# Altium footprint library Passive-Cap.PcbLib: 70 footprints (part 4 of 5)
Each footprint in its own frame and in the unit in brackets; x right, y up, seen from the top. Pads: shape width x height; smd on the part's side, far side on the other; paste and mask are expansions set on the pad; w line width, h text height; cw(c..) or ccw(c..) is an arc to the next point about the centre after c.
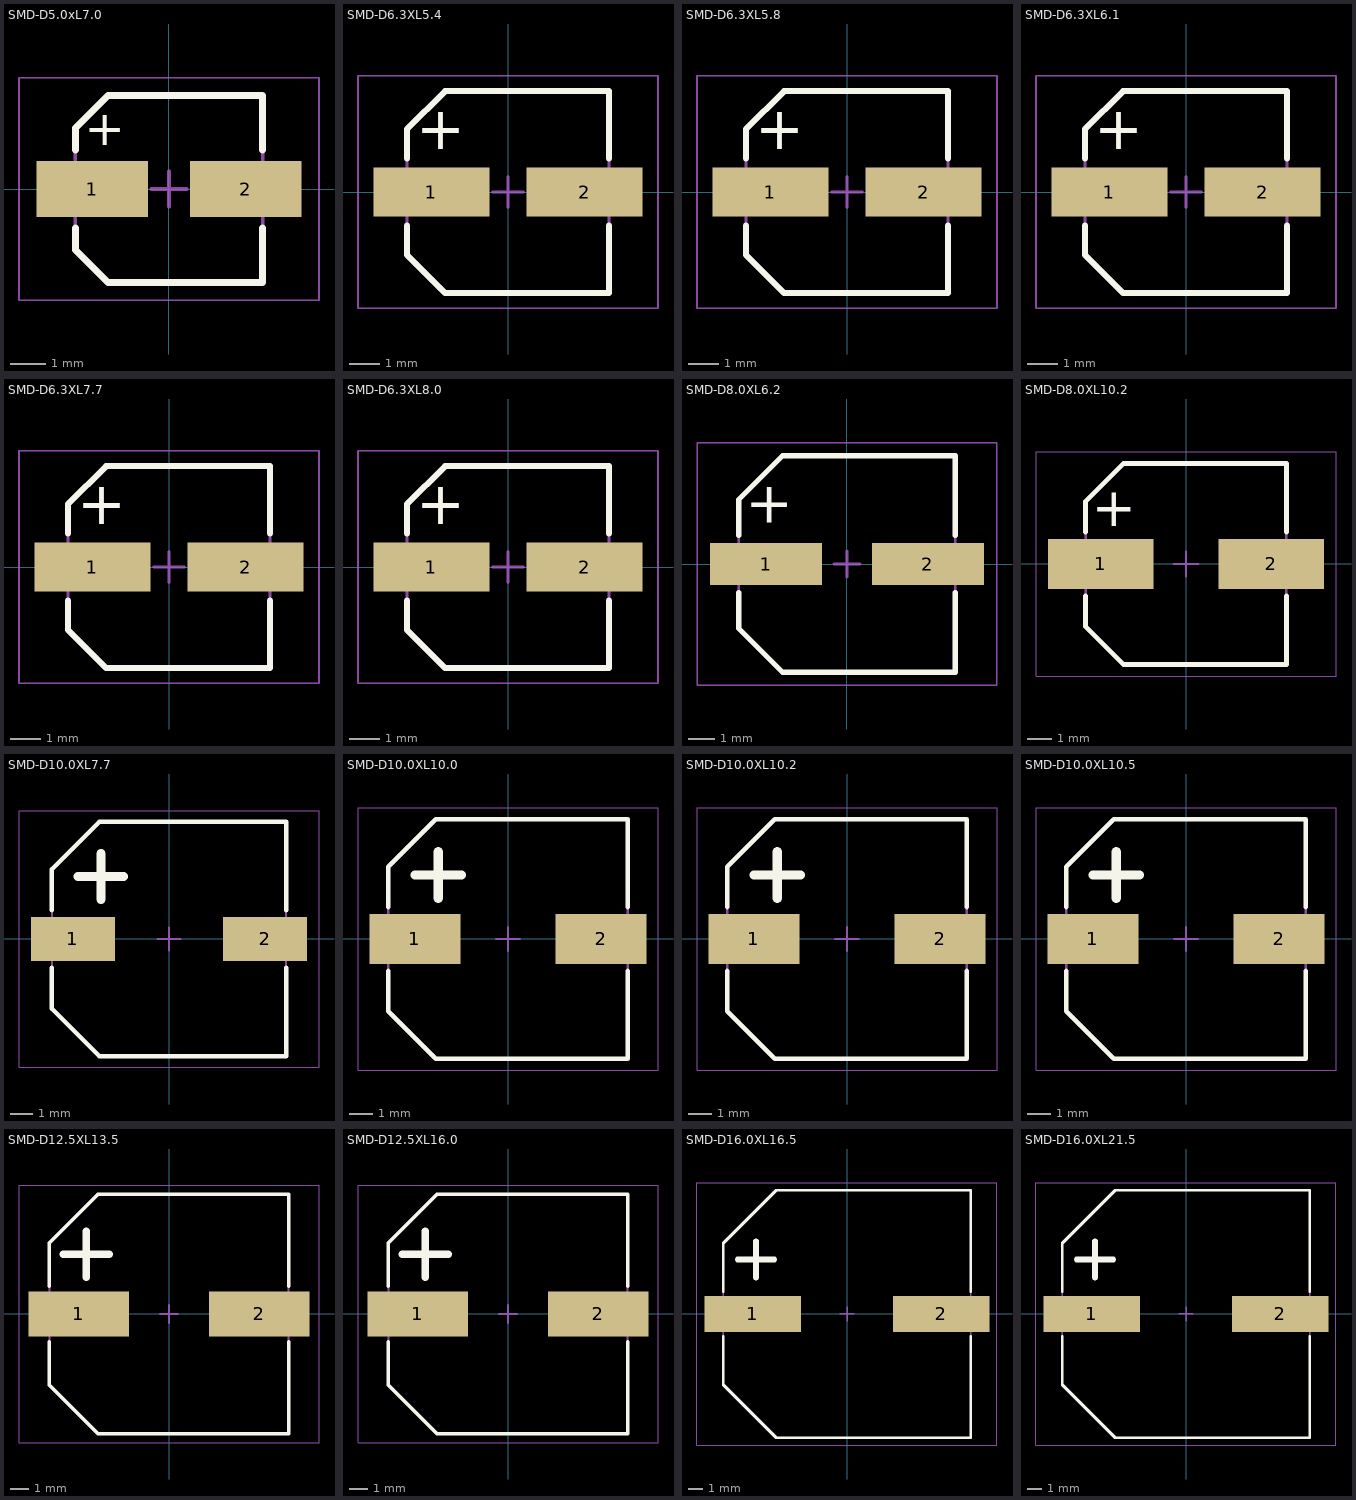
[diagram p3: the footprints below, top view; thin cyan lines are the x and y axes]

## SMD-D5.0xL7.0 [mm] "Aluminum Electrolytic Capacitor, Body 5.30x5.30x7.0mm, IPC Medium Density"
height 5.8
pads (2):
  rect 3.15x1.6 smd: 1(-2.175,0) 2(2.175,0)
Top Overlay:
  lines w0.2: -2.65,-1.1 -2.65,-1.725 -1.725,-2.65 2.65,-2.65 2.65,-1.1 ; -2.65,1.1 -2.65,1.725 -1.725,2.65 2.65,2.65 2.65,1.1
  text "+" at -1.237,2.092 h1
Top Courtyard:
  lines w0.05: -4.25,-3.15 4.25,-3.15 4.25,3.15 -4.25,3.15 -4.25,-3.15
  lines w0.1: -0.5,0 0.5,0 ; 0,-0.5 0,0.5
Top Assembly:
  lines w0.1: -2.65,-1.725 -2.65,1.725 -1.725,2.65 2.65,2.65 2.65,-2.65 -1.725,-2.65 -2.65,-1.725
3D body "CAP SMT AL ELEC D5.00mm H7.00mm S5.30mm.step": height 7, standoff 0, extent -2.75,-2.65 2.75,2.65

## SMD-D6.3XL5.4 [mm] "Aluminum Electrolytic Capacitor, Body 6.60x6.60x5.40mm, IPC Medium Density"
height 5.8
pads (2):
  rect 3.8x1.6 smd: 1(-2.5,0) 2(2.5,0)
Top Overlay:
  lines w0.2: -3.3,-1.1 -3.3,-2.05 -2.05,-3.3 3.3,-3.3 3.3,-1.1 ; -3.3,1.1 -3.3,2.05 -2.05,3.3 3.3,3.3 3.3,1.1
  text "+" at -1.4,2.6 h1.4
Top Courtyard:
  lines w0.05: -4.9,-3.8 -4.9,3.8 4.9,3.8 4.9,-3.8 -4.9,-3.8
  lines w0.1: -0.5,0 0.5,0 ; 0,-0.5 0,0.5
Top Assembly:
  lines w0.1: -3.3,-2.05 -2.05,-3.3 3.3,-3.3 3.3,3.3 -2.05,3.3 -3.3,2.05 -3.3,-2.05
3D body "CAP SMT AL ELEC D6.30mm H5.40mm S6.60mm.step": height 5.3, standoff -0.1, extent -4,-3.4 4,3.2

## SMD-D6.3XL5.8 [mm] "Aluminum Electrolytic Capacitor, Body 6.60x6.60x5.80mm, IPC Medium Density"
height 5.8
pads (2):
  rect 3.8x1.6 smd: 1(-2.5,0) 2(2.5,0)
Top Overlay:
  lines w0.2: -3.3,-1.1 -3.3,-2.05 -2.05,-3.3 3.3,-3.3 3.3,-1.1 ; -3.3,1.1 -3.3,2.05 -2.05,3.3 3.3,3.3 3.3,1.1
  text "+" at -1.4,2.6 h1.4
Top Courtyard:
  lines w0.05: -4.9,-3.8 4.9,-3.8 4.9,3.8 -4.9,3.8 -4.9,-3.8
  lines w0.1: -0.5,0 0.5,0 ; 0,-0.5 0,0.5
Top Assembly:
  lines w0.1: -3.3,-2.05 -3.3,2.05 -2.05,3.3 3.3,3.3 3.3,-3.3 -2.05,-3.3 -3.3,-2.05
3D body "CAP SMT AL ELEC D6.30mm H5.80mm S6.60mm.step": height 5.8, standoff 0, extent -4,-3.3 4,3.3

## SMD-D6.3XL6.1 [mm] "Aluminum Electrolytic Capacitor, Body 6.60x6.60x6.1mm, IPC Medium Density"
height 5.8
pads (2):
  rect 3.8x1.6 smd: 1(-2.5,0) 2(2.5,0)
Top Overlay:
  lines w0.2: -3.3,-1.1 -3.3,-2.05 -2.05,-3.3 3.3,-3.3 3.3,-1.1 ; -3.3,1.1 -3.3,2.05 -2.05,3.3 3.3,3.3 3.3,1.1
  text "+" at -1.4,2.6 h1.4
Top Courtyard:
  lines w0.05: -4.9,-3.8 -4.9,3.8 4.9,3.8 4.9,-3.8 -4.9,-3.8
  lines w0.1: -0.5,0 0.5,0 ; 0,-0.5 0,0.5
Top Assembly:
  lines w0.1: -3.3,-2.05 -2.05,-3.3 3.3,-3.3 3.3,3.3 -2.05,3.3 -3.3,2.05 -3.3,-2.05
3D body "CAP SMT AL ELEC D6.30mm H6.10mm S6.60mm LeadSpanMax 7.80mm.step": height 6.1, standoff 0, extent -3.9,-3.3 3.9,3.3

## SMD-D6.3XL7.7 [mm] "Aluminum Electrolytic Capacitor, Body 6.60x6.60x7.70mm, IPC Medium Density"
height 5.8
pads (2):
  rect 3.8x1.6 smd: 1(-2.5,0) 2(2.5,0)
Top Overlay:
  lines w0.2: -3.3,-1.1 -3.3,-2.05 -2.05,-3.3 3.3,-3.3 3.3,-1.1 ; -3.3,1.1 -3.3,2.05 -2.05,3.3 3.3,3.3 3.3,1.1
  text "+" at -1.4,2.6 h1.4
Top Value:
  text "'.Comment'" at -2.634,-0.54 h2
Top Designator:
  text "'.Designator'" at -6.297,-0.461 h2.2
Top Courtyard:
  lines w0.05: -4.9,-3.8 4.9,-3.8 4.9,3.8 -4.9,3.8 -4.9,-3.8
  lines w0.1: -0.5,0 0.5,0 ; 0,-0.5 0,0.5
Top Assembly:
  lines w0.1: -3.3,-2.05 -3.3,2.05 -2.05,3.3 3.3,3.3 3.3,-3.3 -2.05,-3.3 -3.3,-2.05
3D body "CAP SMT AL ELEC D6.30mm H7.70mm S6.60mm.step": height 7.7, standoff 0, extent -4,-3.3 4,3.3

## SMD-D6.3XL8.0 [mm] "Aluminum Electrolytic Capacitor, Body 6.60x6.60x8.00mm, IPC Medium Density"
height 5.8
pads (2):
  rect 3.8x1.6 smd: 1(-2.5,0) 2(2.5,0)
Top Overlay:
  lines w0.2: -3.3,-1.1 -3.3,-2.05 -2.05,-3.3 3.3,-3.3 3.3,-1.1 ; -3.3,1.1 -3.3,2.05 -2.05,3.3 3.3,3.3 3.3,1.1
  text "+" at -1.4,2.6 h1.4
Top Courtyard:
  lines w0.05: -4.9,-3.8 -4.9,3.8 4.9,3.8 4.9,-3.8 -4.9,-3.8
  lines w0.1: -0.5,0 0.5,0 ; 0,-0.5 0,0.5
Top Assembly:
  lines w0.1: -3.3,-2.05 -2.05,-3.3 3.3,-3.3 3.3,3.3 -2.05,3.3 -3.3,2.05 -3.3,-2.05
3D body "CAP SMT AL ELEC D6.30mm H8.00mm S6.60mm LeadSpanMax 7.80mm.step": height 8, standoff 0, extent -3.9,-3.3 3.9,3.3

## SMD-D8.0XL6.2 [mm] "Aluminum Electrolytic Capacitor, Body 8.30x8.30x6.20mm, IPC Medium Density"
height 6.2
pads (2):
  rect 4.3x1.6 smd: 1(-3.1,0) 2(3.1,0)
Top Overlay:
  lines w0.2: -4.15,-1.1 -4.15,-2.475 -2.475,-4.15 4.15,-4.15 4.15,-1.1 ; -4.15,1.1 -4.15,2.475 -2.475,4.15 4.15,4.15 4.15,1.1
  text "+" at -2.064,2.936 h1.6
Top Value:
  text "'.Comment'" at -3.035,-0.419 h1.4
Top Designator:
  text "'.Designator'" at -4.021,-0.546 h1.4
Top Courtyard:
  lines w0.05: -5.75,-4.65 -5.75,4.65 5.75,4.65 5.75,-4.65 -5.75,-4.65
  lines w0.1: -0.5,0 0.5,0 ; 0,-0.5 0,0.5
Top Assembly:
  lines w0.1: -4.15,-2.475 -2.475,-4.15 4.15,-4.15 4.15,4.15 -2.475,4.15 -4.15,2.475 -4.15,-2.475
3D body "CAP SMT AL ELEC D8.00mm H6.20mm S8.30mm.step": height 6.2, standoff 0, extent -5,-4.15 5,4.15

## SMD-D8.0XL10.2 [mm] "Aluminum Electrolytic Capacitor, Body 8.30x8.30x10.20mm, IPC Medium Density"
height 10.2
pads (2):
  rect 4.35x2.05 smd: 1(-3.525,0) 2(3.525,0)
Top Overlay:
  lines w0.2: -4.15,-1.325 -4.15,-2.588 -2.588,-4.15 4.15,-4.15 4.15,-1.325 ; -4.15,1.325 -4.15,2.587 -2.588,4.15 4.15,4.15 4.15,1.325
  text "+" at -2.064,2.936 h1.6
Top Value:
  text "'.Comment'" at -3.035,-0.419 h1.4
Top Designator:
  text "'.Designator'" at -4.021,-0.546 h1.4
Top Courtyard:
  lines w0.05: -6.2,-4.65 6.2,-4.65 6.2,4.65 -6.2,4.65 -6.2,-4.65
  lines w0.1: -0.5,0 0.5,0 ; 0,-0.5 0,0.5
Top Assembly:
  lines w0.1: -4.15,-2.588 -4.15,2.587 -2.588,4.15 4.15,4.15 4.15,-4.15 -2.588,-4.15 -4.15,-2.588
3D body "CAP SMT AL ELEC D8.00mm H10.00mm S8.30mm.step": height 10, standoff 0, extent -5,-4.15 5,4.15

## SMD-D10.0XL7.7 [mm] "Aluminum Electrolytic Capacitor, Body 10.30x10.30x7.70mm, IPC Medium Density"
height 7.7
pads (2):
  rect 3.7x1.95 smd: 1(-4.225,0) 2(4.225,0)
Top Overlay:
  lines w0.2: -5.15,-1.275 -5.15,-3.063 -3.063,-5.15 5.15,-5.15 5.15,-1.275 ; -5.15,1.275 -5.15,3.062 -3.063,5.15 5.15,5.15 5.15,1.275
  lines w0.4: -4,2.75 -2,2.75 ; -3,1.75 -3,3.75
Top Value:
  text "'.Comment'" at -4.333,-0.598 h2
Top Designator:
  text "'.Designator'" at -5.739,-0.78 h2
Top Courtyard:
  lines w0.05: -6.6,-5.65 6.6,-5.65 6.6,5.65 -6.6,5.65 -6.6,-5.65
  lines w0.1: -0.5,0 0.5,0 ; 0,-0.5 0,0.5
Top Assembly:
  lines w0.1: -5.15,-3.063 -5.15,3.062 -3.063,5.15 5.15,5.15 5.15,-5.15 -3.063,-5.15 -5.15,-3.063
3D body "CAP SMT AL ELEC D10.00mm H7.70mm S10.30mm.step": height 7.7, standoff 0, extent -5.45,-5.15 5.45,5.15

## SMD-D10.0XL10.0 [mm] "Aluminum Electrolytic Capacitor, Body 10.30x10.30x10.00mm, IPC Medium Density"
height 10
pads (2):
  rect 3.9x2.15 smd: 1(-4,0) 2(4,0)
Top Overlay:
  lines w0.2: -5.15,-1.375 -5.15,-3.113 -3.113,-5.15 5.15,-5.15 5.15,-1.375 ; -5.15,1.375 -5.15,3.112 -3.113,5.15 5.15,5.15 5.15,1.375
  lines w0.4: -4,2.75 -2,2.75 ; -3,1.75 -3,3.75
Top Value:
  text "'.Comment'" at -4.333,-0.598 h2
Top Designator:
  text "'.Designator'" at -5.739,-0.78 h2
Top Courtyard:
  lines w0.05: -6.45,-5.65 -6.45,5.65 6.45,5.65 6.45,-5.65 -6.45,-5.65
  lines w0.1: -0.5,0 0.5,0 ; 0,-0.5 0,0.5
Top Assembly:
  lines w0.1: -5.15,-3.113 -3.113,-5.15 5.15,-5.15 5.15,5.15 -3.113,5.15 -5.15,3.112 -5.15,-3.113
3D body "CAP SMT AL ELEC D10.00mm H10.00mm S10.30mm.step": height 10, standoff 0, extent -5.45,-5.15 5.45,5.15

## SMD-D10.0XL10.2 [mm] "Aluminum Electrolytic Capacitor, Body 10.30x10.30x10.20mm, IPC Medium Density"
height 10
pads (2):
  rect 3.9x2.15 smd: 1(-4,0) 2(4,0)
Top Overlay:
  lines w0.2: -5.15,-1.375 -5.15,-3.113 -3.113,-5.15 5.15,-5.15 5.15,-1.375 ; -5.15,1.375 -5.15,3.112 -3.113,5.15 5.15,5.15 5.15,1.375
  lines w0.4: -4,2.75 -2,2.75 ; -3,1.75 -3,3.75
Top Value:
  text "'.Comment'" at -4.333,-0.598 h2
Top Designator:
  text "'.Designator'" at -5.739,-0.78 h2
Top Courtyard:
  lines w0.05: -6.45,-5.65 6.45,-5.65 6.45,5.65 -6.45,5.65 -6.45,-5.65
  lines w0.1: -0.5,0 0.5,0 ; 0,-0.5 0,0.5
Top Assembly:
  lines w0.1: -5.15,-3.113 -5.15,3.112 -3.113,5.15 5.15,5.15 5.15,-5.15 -3.113,-5.15 -5.15,-3.113
3D body "CAP SMT AL ELEC D10.00mm H10.20mm S10.30mm.step": height 10.2, standoff 0, extent -5.45,-5.15 5.45,5.15

## SMD-D10.0XL10.5 [mm] "Aluminum Electrolytic Capacitor, Body 10.30x10.30x10.50mm, IPC Medium Density"
height 10
pads (2):
  rect 3.9x2.15 smd: 1(-4,0) 2(4,0)
Top Overlay:
  lines w0.2: -5.15,-1.375 -5.15,-3.113 -3.113,-5.15 5.15,-5.15 5.15,-1.375 ; -5.15,1.375 -5.15,3.112 -3.113,5.15 5.15,5.15 5.15,1.375
  lines w0.4: -4,2.75 -2,2.75 ; -3,1.75 -3,3.75
Top Value:
  text "'.Comment'" at -4.333,-0.598 h2
Top Designator:
  text "'.Designator'" at -5.739,-0.78 h2
Top Courtyard:
  lines w0.05: -6.45,-5.65 -6.45,5.65 6.45,5.65 6.45,-5.65 -6.45,-5.65
  lines w0.1: -0.5,0 0.5,0 ; 0,-0.5 0,0.5
Top Assembly:
  lines w0.1: -5.15,-3.113 -3.113,-5.15 5.15,-5.15 5.15,5.15 -3.113,5.15 -5.15,3.112 -5.15,-3.113
3D body "CAP SMT AL ELEC D10.00mm H10.50mm S10.30mm.step": height 10.5, standoff 0, extent -5.45,-5.15 5.45,5.15

## SMD-D12.5XL13.5 [mm] "Aluminum Electrolytic Capacitor, Body 13.00x13.00x13.50mm, IPC Medium Density"
height 13.5
pads (2):
  rect 5.45x2.45 smd: 1(-4.9,0) 2(4.9,0)
Top Overlay:
  lines w0.2: -6.5,-1.525 -6.5,-3.863 -3.862,-6.5 6.5,-6.5 6.5,-1.525 ; -6.5,1.525 -6.5,3.862 -3.862,6.5 6.5,6.5 6.5,1.525
  lines w0.4: -5.75,3.25 -3.25,3.25 ; -4.5,2 -4.5,4.5
Top Value:
  text "'.Comment'" at -4.333,-0.598 h2
Top Designator:
  text "'.Designator'" at -5.739,-0.78 h2
Top Courtyard:
  lines w0.05: -8.15,-7 -8.15,7 8.15,7 8.15,-7 -8.15,-7
  lines w0.1: -0.5,0 0.5,0 ; 0,-0.5 0,0.5
Top Assembly:
  lines w0.1: -6.5,-3.863 -3.862,-6.5 6.5,-6.5 6.5,6.5 -3.862,6.5 -6.5,3.862 -6.5,-3.863
3D body "CAP SMT AL ELEC D12.50mm H13.50mm S13.00mm.step": height 13.5, standoff 0, extent -6.85,-6.5 6.85,6.5

## SMD-D12.5XL16.0 [mm] "Aluminum Electrolytic Capacitor, Body 13.00x13.00x16.00mm, IPC Medium Density"
height 13.5
pads (2):
  rect 5.45x2.45 smd: 1(-4.9,0) 2(4.9,0)
Top Overlay:
  lines w0.2: -6.5,-1.525 -6.5,-3.863 -3.862,-6.5 6.5,-6.5 6.5,-1.525 ; -6.5,1.525 -6.5,3.862 -3.862,6.5 6.5,6.5 6.5,1.525
  lines w0.4: -5.75,3.25 -3.25,3.25 ; -4.5,2 -4.5,4.5
Top Value:
  text "'.Comment'" at -4.333,-0.598 h2
Top Designator:
  text "'.Designator'" at -5.739,-0.78 h2
Top Courtyard:
  lines w0.05: -8.15,-7 -8.15,7 8.15,7 8.15,-7 -8.15,-7
  lines w0.1: -0.5,0 0.5,0 ; 0,-0.5 0,0.5
Top Assembly:
  lines w0.1: -6.5,-3.863 -3.862,-6.5 6.5,-6.5 6.5,6.5 -3.862,6.5 -6.5,3.862 -6.5,-3.863
3D body "CAP SMT AL ELEC D12.50mm H16.00mm S13.00mm.step": height 16, standoff 0, extent -6.85,-6.5 6.85,6.5

## SMD-D16.0XL16.5 [mm] "Aluminum Electrolytic Capacitor, Body 17.00x17.00x16.50mm, IPC Medium Density"
height 16.5
pads (2):
  rect 6.6x2.45 smd: 1(-6.475,0) 2(6.475,0)
Top Overlay:
  lines w0.2: -8.5,-1.525 -8.5,-4.863 -4.862,-8.5 8.5,-8.5 8.5,-1.525 ; -8.5,1.525 -8.5,4.862 -4.862,8.5 8.5,8.5 8.5,1.525
  lines w0.4: -7.5,3.75 -5,3.75 ; -6.25,2.5 -6.25,5
Top Value:
  text "'.Comment'" at -4.333,-0.598 h2
Top Designator:
  text "'.Designator'" at -5.739,-0.78 h2
Top Courtyard:
  lines w0.05: -10.3,-9 -10.3,9 10.3,9 10.3,-9 -10.3,-9
  lines w0.1: -0.5,0 0.5,0 ; 0,-0.5 0,0.5
Top Assembly:
  lines w0.1: -8.5,-4.863 -4.862,-8.5 8.5,-8.5 8.5,8.5 -4.862,8.5 -8.5,4.862 -8.5,-4.863
3D body "CAP SMT AL ELEC D16.00mm H16.50mm S17.00mm.step": height 16.5, standoff 0, extent -9.5,-8.5 9.5,8.5

## SMD-D16.0XL21.5 [mm] "Aluminum Electrolytic Capacitor, Body 17.00x17.00x21.50mm, IPC Medium Density"
height 16.5
pads (2):
  rect 6.6x2.45 smd: 1(-6.475,0) 2(6.475,0)
Top Overlay:
  lines w0.2: -8.5,-1.525 -8.5,-4.863 -4.862,-8.5 8.5,-8.5 8.5,-1.525 ; -8.5,1.525 -8.5,4.862 -4.862,8.5 8.5,8.5 8.5,1.525
  lines w0.4: -7.5,3.75 -5,3.75 ; -6.25,2.5 -6.25,5
Top Value:
  text "'.Comment'" at -4.333,-0.598 h2
Top Designator:
  text "'.Designator'" at -5.739,-0.78 h2
Top Courtyard:
  lines w0.05: -10.3,-9 10.3,-9 10.3,9 -10.3,9 -10.3,-9
  lines w0.1: -0.5,0 0.5,0 ; 0,-0.5 0,0.5
Top Assembly:
  lines w0.1: -8.5,-4.863 -8.5,4.862 -4.862,8.5 8.5,8.5 8.5,-8.5 -4.862,-8.5 -8.5,-4.863
3D body "CAP SMT AL ELEC D16.00mm H21.50mm S17.00mm.step": height 21.5, standoff 0, extent -9.5,-8.5 9.5,8.5